# Altium footprint library Inductance.PcbLib: 64 footprints (part 3 of 4)
Each footprint in its own frame and in the unit in brackets; x right, y up, seen from the top. Pads: shape width x height; smd on the part's side, far side on the other; paste and mask are expansions set on the pad; w line width, h text height; cw(c..) or ccw(c..) is an arc to the next point about the centre after c.
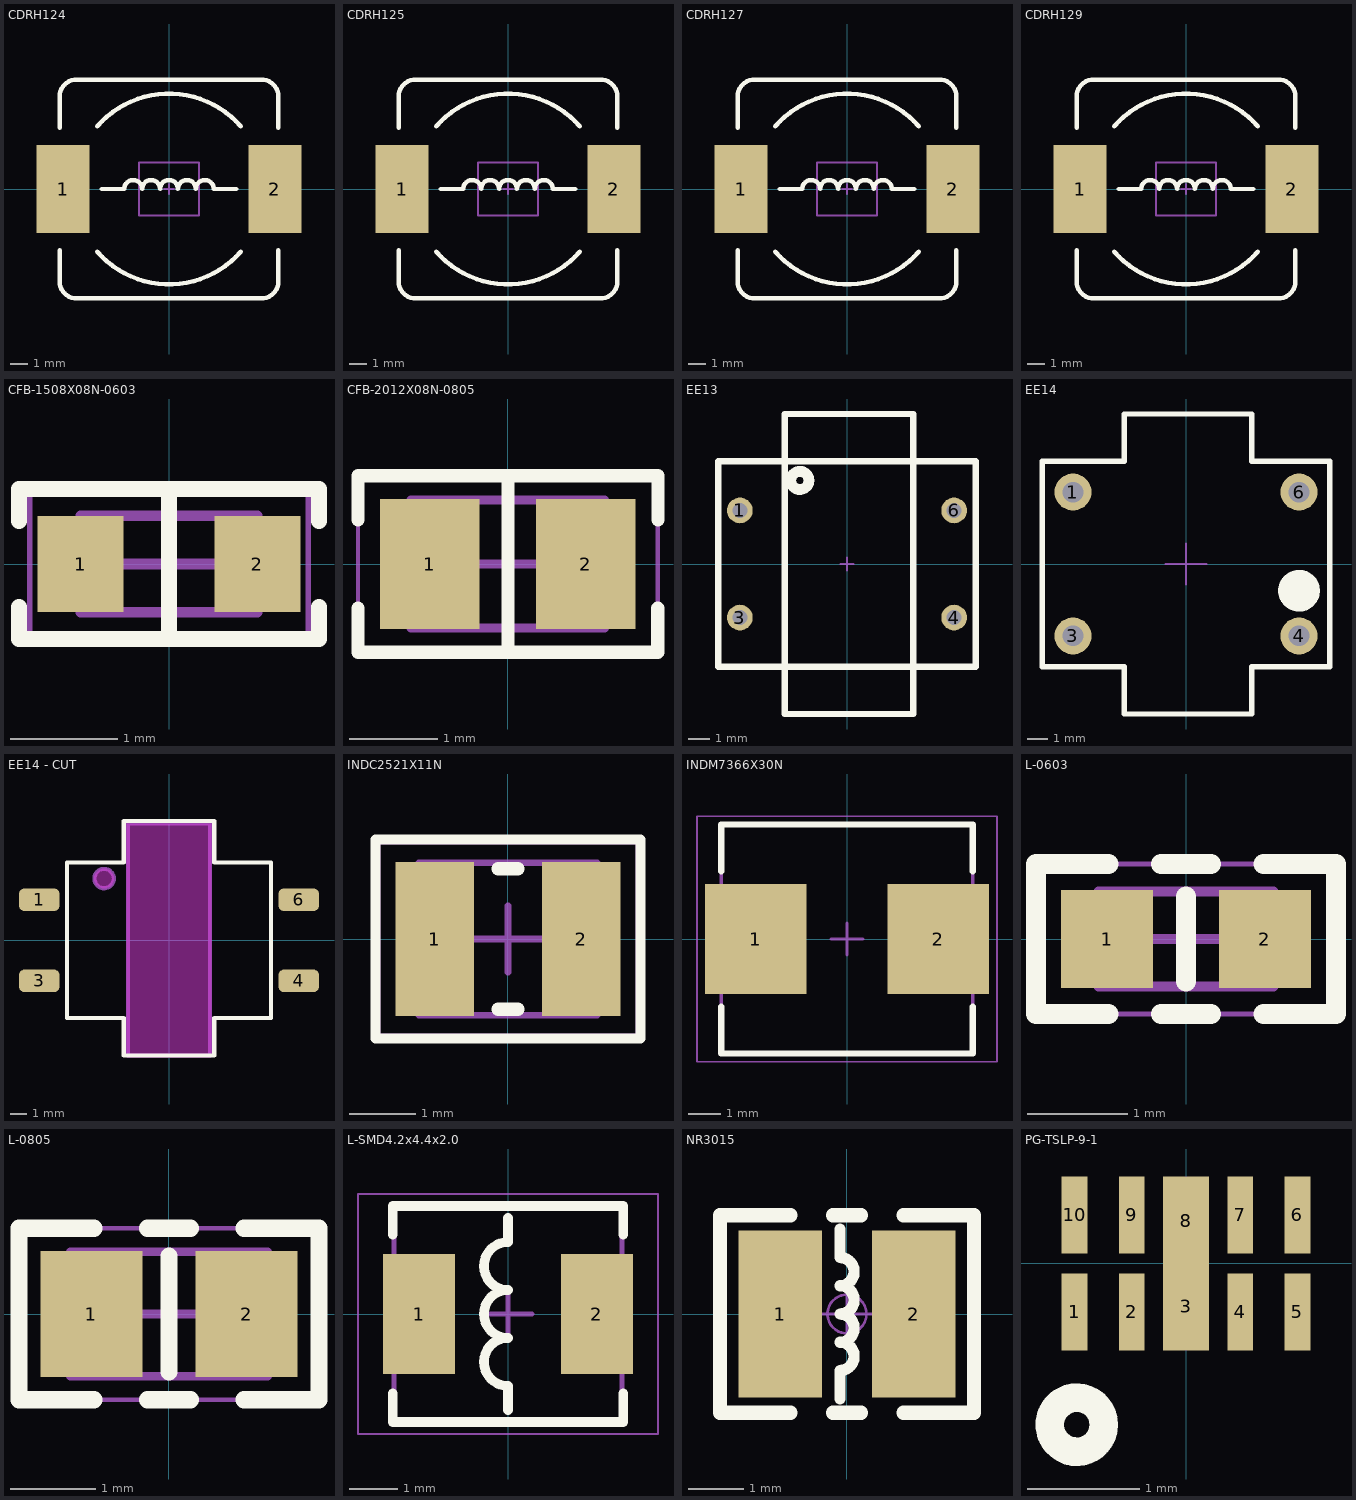
[diagram p2: the footprints below, top view; thin cyan lines are the x and y axes]

## CDRH124 [mm] "12*12*4.5mm（长宽高）"
pads (2):
  rect 3x5 smd: 1(-6,0) 2(6,0)
Top Overlay:
  lines w0.254: -6.2,-3.475 -6.2,-5.23 ccw(c-5.23,-5.23) -5.23,-6.2 5.23,-6.2 ccw(c5.23,-5.23) 6.2,-5.23 6.2,-3.475 ; -6.2,3.475 -6.2,5.23 cw(c-5.23,5.23) -5.23,6.2 5.23,6.2 cw(c5.23,5.23) 6.2,5.23 6.2,3.475 ; -4.064,-3.556 ccw(c0,0) 4.064,-3.556 ; -4.064,3.556 cw(c0,0) 4.064,3.556 ; -3.81,0 -2.54,0 cw(c-2.032,0) -1.524,0 cw(c-1.016,0) -0.508,0 cw(c0,0) 0.508,0 cw(c1.016,0) 1.524,0 cw(c2.032,0) 2.54,0 3.81,0
Top Component Outline:
  lines w0.1: -1.7,-1.5 -1.7,1.5 1.7,1.5 1.7,-1.5 -1.7,-1.5
Top Component Center:
  lines w0.1: -0.3,0 0.3,0 ; 0,-0.3 0,0.3
Top Value:
  text "'.Comment'" at -2.75,-0.38 h1.27
Top Designator:
  text ".Designator" at -3.769,-0.318 h1.52
3D body "CDRH124.STEP": height 4.55, standoff 0.05, extent -5.873,-6.031 6.127,5.969

## CDRH125 [mm] "12*12*5mm（长宽高）"
pads (2):
  rect 3x5 smd: 1(-6,0) 2(6,0)
Top Overlay:
  lines w0.254: -6.2,-3.475 -6.2,-5.23 ccw(c-5.23,-5.23) -5.23,-6.2 5.23,-6.2 ccw(c5.23,-5.23) 6.2,-5.23 6.2,-3.475 ; -6.2,3.475 -6.2,5.23 cw(c-5.23,5.23) -5.23,6.2 5.23,6.2 cw(c5.23,5.23) 6.2,5.23 6.2,3.475 ; -4.064,-3.556 ccw(c0,0) 4.064,-3.556 ; -4.064,3.556 cw(c0,0) 4.064,3.556 ; -3.81,0 -2.54,0 cw(c-2.032,0) -1.524,0 cw(c-1.016,0) -0.508,0 cw(c0,0) 0.508,0 cw(c1.016,0) 1.524,0 cw(c2.032,0) 2.54,0 3.81,0
Top Component Outline:
  lines w0.1: -1.7,-1.5 -1.7,1.5 1.7,1.5 1.7,-1.5 -1.7,-1.5
Top Component Center:
  lines w0.1: -0.3,0 0.3,0 ; 0,-0.3 0,0.3
Top Value:
  text "'.Comment'" at -2.75,-0.38 h1.27
Top Designator:
  text ".Designator" at -3.769,-0.318 h1.52
3D body "CDRH125.STEP": height 5.05, standoff 0.05, extent -5.873,-5.969 6.127,6.031

## CDRH127 [mm] "12*12*8mm（长宽高）"
pads (2):
  rect 3x5 smd: 1(-6,0) 2(6,0)
Top Overlay:
  lines w0.254: -6.2,-3.475 -6.2,-5.23 ccw(c-5.23,-5.23) -5.23,-6.2 5.23,-6.2 ccw(c5.23,-5.23) 6.2,-5.23 6.2,-3.475 ; -6.2,3.475 -6.2,5.23 cw(c-5.23,5.23) -5.23,6.2 5.23,6.2 cw(c5.23,5.23) 6.2,5.23 6.2,3.475 ; -4.064,-3.556 ccw(c0,0) 4.064,-3.556 ; -4.064,3.556 cw(c0,0) 4.064,3.556 ; -3.81,0 -2.54,0 cw(c-2.032,0) -1.524,0 cw(c-1.016,0) -0.508,0 cw(c0,0) 0.508,0 cw(c1.016,0) 1.524,0 cw(c2.032,0) 2.54,0 3.81,0
Top Component Outline:
  lines w0.1: -1.7,-1.5 -1.7,1.5 1.7,1.5 1.7,-1.5 -1.7,-1.5
Top Component Center:
  lines w0.1: -0.3,0 0.3,0 ; 0,-0.3 0,0.3
Top Value:
  text "'.Comment'" at -2.75,-0.38 h1.27
Top Designator:
  text ".Designator" at -3.769,-0.318 h1.52
3D body "CDRH127.STEP": height 7.8, standoff 0, extent -5.873,-6.031 6.127,5.969

## CDRH129 [mm] "12*12*9.5mm（长宽高）"
pads (2):
  rect 3x5 smd: 1(-6,0) 2(6,0)
Top Overlay:
  lines w0.254: -6.2,-3.475 -6.2,-5.23 ccw(c-5.23,-5.23) -5.23,-6.2 5.23,-6.2 ccw(c5.23,-5.23) 6.2,-5.23 6.2,-3.475 ; -6.2,3.475 -6.2,5.23 cw(c-5.23,5.23) -5.23,6.2 5.23,6.2 cw(c5.23,5.23) 6.2,5.23 6.2,3.475 ; -4.064,-3.556 ccw(c0,0) 4.064,-3.556 ; -4.064,3.556 cw(c0,0) 4.064,3.556 ; -3.81,0 -2.54,0 cw(c-2.032,0) -1.524,0 cw(c-1.016,0) -0.508,0 cw(c0,0) 0.508,0 cw(c1.016,0) 1.524,0 cw(c2.032,0) 2.54,0 3.81,0
Top Component Outline:
  lines w0.1: -1.7,-1.5 1.7,-1.5 1.7,1.5 -1.7,1.5 -1.7,-1.5
Top Component Center:
  lines w0.1: -0.3,0 0.3,0 ; 0,-0.3 0,0.3
Top Value:
  text "'.Comment'" at -2.75,-0.38 h1.27
Top Designator:
  text ".Designator" at -3.769,-0.318 h1.52
3D body "CDRH129.STEP": height 9.65, standoff 0.05, extent -6.127,-5.904 5.873,6.096

## CFB-1508X08N-0603 [mm] "Chip Inductor, 2-Leads, Body 1.55x0.80mm, IPC Medium Density"
height 0.8
pads (2):
  rect 0.8x0.9 smd: 1(-0.825,0) 2(0.825,0)
Top Overlay:
  lines w0.15: -1.4,-0.4 -1.4,-0.7 1.4,-0.7 1.4,-0.4 ; -1.4,0.4 -1.4,0.7 1.4,0.7 1.4,0.4 ; 0,-0.7 0,0.7
Top Courtyard:
  lines w0.05: -1.3,-0.7 1.3,-0.7 1.3,0.7 -1.3,0.7 -1.3,-0.7
  lines w0.1: -0.45,0 0.45,0 ; 0,-0.45 0,0.45
Top Assembly (Mech20):
  lines w0.1: -0.825,-0.45 0.825,-0.45 0.825,0.45 -0.825,0.45 -0.825,-0.45
3D body "0603L.STEP": height 0.8, standoff 0, extent -0.8,-0.419 0.8,0.381

## CFB-2012X08N-0805 [mm] "Chip Inductor, 2-Leads, Body 2.00x1.25mm, IPC Medium Density"
height 0.85
pads (2):
  rect 1.13x1.47 smd: 1(-0.885,0) 2(0.885,0)
Top Overlay:
  lines w0.152: -1.7,-0.5 -1.7,-1 1.7,-1 1.7,-0.5 ; -1.7,0.5 -1.7,1 1.704,1 1.704,0.504 ; 0.002,-0.998 0.002,1
Top Value:
  text "'.Comment'" at -3.464,-0.478 h1.6
Top Designator:
  text ".Designator" at -3.96,-0.334 h1.6
Top Courtyard:
  lines w0.05: -1.7,-1 1.7,-1 1.7,1 -1.7,1 -1.7,-1
  lines w0.1: -0.5,0 0.5,0 ; 0,-0.5 0,0.5
Top Assembly (Mech20):
  lines w0.1: -1.1,-0.725 1.1,-0.725 1.1,0.725 -1.1,0.725 -1.1,-0.725
3D body "0805L.STEP": height 0.9, standoff 0, extent -1,-0.6 1,0.6

## EE13 [mm] "600,1:1音频变压器"
pads (4):
  round 1.2 hole 0.7: 1(-5,2.5) 3(-5,-2.5) 4(5,-2.5) 6(5,2.5)
Top Overlay:
  circle w0.5: c-2.2,3.9 r0.424
  lines w0.3: -6,-4.8 -6,4.8 6,4.8 6,-4.8 -6,-4.8 ; -2.9,-7 -2.9,7 3.1,7 3.1,-7 -2.9,-7
Top Component Outline:
  lines w0.1: -6,-4.8 -2.9,-4.8 -2.9,-7 3.1,-7 3.1,-4.8 6,-4.8 6,4.8 3.1,4.8 3.1,7 -2.9,7 -2.9,4.8 -6,4.8 -6,-4.8
Top Component Center:
  lines w0.1: -0.3,0 0.3,0 ; 0,-0.3 0,0.3
Top Value:
  text "'.Comment'" at -2.75,-0.38 h1.27
Top Designator:
  text ".Designator" at -3.769,-0.318 h1.52
3D body "EE13-T304.SLDPRT": height 12.38, standoff 0.1, extent -6.4,-6.61 6,6.61

## EE14 [mm]
pads (4):
  round 1.8 hole 1: 1(-5.5,3.5) 3(-5.5,-3.5) 4(5.5,-3.5) 6(5.5,3.5)
Top Overlay:
  circle w1.016: c5.5,-1.3 r0.508
  lines w0.254: -7,-5 -7,5 -3,5 -3,7.3 3.2,7.3 3.2,5 7,5 7,-5 3.2,-5 3.2,-7.3 -3,-7.3 -3,-5 -7,-5
Top Component Outline:
  lines w0.1: -3.05,7.25 -3.05,5 -7,5 -7,-5 -3.05,-5 -3.05,-7.3 3.15,-7.3 3.15,-5 7,-5 7,4.991 3.159,4.991 ; -3.05,7.3 3.15,7.3 ; 3.15,5 3.15,7.25
Top Component Center:
  lines w0.1: -1,0 1,0 ; 0,-1 0,1
Top Value:
  text "'.Comment'" at -3.297,-0.455 h1.52
Top Designator:
  text ".Designator" at -4.409,-0.372 h1.78
3D body "EE13-T304.SLDPRT": height 12.38, standoff 0.1, extent -6.4,-6.61 6,6.61

## EE14 - CUT [mm]
pads (4):
  rrect50% 2.5x1.4 smd: 1(-8,2.5) 3(-8,-2.5) 4(8,-2.5) 6(8,2.5)
Top Overlay:
  lines w0.254: -6.3,-4.8 -6.3,4.8 -2.794,4.8 -2.794,7.366 2.794,7.366 2.794,4.8 6.3,4.8 6.3,-4.8 2.794,-4.8 2.794,-7.112 -2.794,-7.112 -2.794,-4.8 -6.3,-4.8
Keep-Out Layer:
  board cut-out: -4,3.21 -4.119,3.21 -4.34,3.301 -4.509,3.47 -4.6,3.691 -4.6,3.81 -4.6,3.929 -4.509,4.15 -4.34,4.319 -4.119,4.41 -4,4.41 -3.881,4.41 -3.66,4.319 -3.491,4.15 -3.4,3.929 -3.4,3.81 -3.4,3.691 -3.491,3.47 -3.66,3.301 -3.881,3.21
  board cut-out: -2.6,-7.2 -2.6,7.2 2.6,7.2 2.6,-7.2
Board Outline:
  circle w0.254: c-4,3.81 r0.6
  lines w0.254: -2.54,-7.112 2.54,-7.112 2.54,7.2 -2.54,7.2 -2.54,-7.112
Top Designator:
  text ".Designator" at 7.618,-0.381 h1.52

## INDC2521X11N [mm] "Chip Inductor, 2-Leads, Body 2.50x2.10mm, IPC Medium Density"
height 1.1
pads (2):
  rect 1.19x2.32 smd: 1(-1.105,0) 2(1.105,0)
Top Overlay:
  lines w0.152: -2,-1.5 2,-1.5 2,1.5 -2,1.5 -2,-1.5
  lines w0.2: -0.15,-1.06 0.15,-1.06 ; -0.15,1.06 0.15,1.06
Top Courtyard:
  lines w0.05: -1.95,-1.45 -1.95,1.45 1.95,1.45 1.95,-1.45 -1.95,-1.45
  lines w0.1: -0.5,0 0.5,0 ; 0,-0.5 0,0.5
Top Assembly (Mech20):
  lines w0.1: -1.35,-1.15 -1.35,1.15 1.35,1.15 1.35,-1.15 -1.35,-1.15
3D body: height 1.1, standoff 0, extent -0.85,-1.15 0.85,1.15
3D body: height 1.1, standoff 0, extent -1.35,-1.15 -0.85,1.15
3D body: height 1.1, standoff 0, extent 0.85,-1.15 1.35,1.15

## INDM7366X30N [mm] "Molded Inductor, 2-Leads, Body 7.30x6.60mm, IPC Medium Density"
height 3
pads (2):
  rect 3.15x3.4 smd: 1(-2.825,0) 2(2.825,0)
Top Overlay:
  lines w0.2: -3.9,-2.1 -3.9,-3.55 3.9,-3.55 3.9,-2.1 ; -3.9,2.1 -3.9,3.55 3.9,3.55 3.9,2.1
Top Value:
  text "'.Comment'" at -4.314,-0.581 h2
Top Designator:
  text "'.Designator'" at -5.72,-0.418 h2
Top Courtyard:
  lines w0.05: -4.65,-3.8 4.65,-3.8 4.65,3.8 -4.65,3.8 -4.65,-3.8
  lines w0.1: -0.5,0 0.5,0 ; 0,-0.5 0,0.5
Top Assembly (Mech20):
  lines w0.1: -3.9,-3.55 3.9,-3.55 3.9,3.55 -3.9,3.55 -3.9,-3.55
3D body: height 3, standoff 0, extent -3.9,-3.55 3.9,3.55

## L-0603 [mm] "Chip Inductor, 2-Leads, Body 1.60x0.80mm, IPC Medium Density"
height 0.8
pads (2):
  rect 0.92x0.98 smd: 1(-0.79,0) 2(0.79,0)
Top Overlay:
  lines w0.2: -0.775,-0.75 -1.5,-0.75 -1.5,0.75 -0.775,0.75 ; -0.25,-0.75 0.25,-0.75 ; -0.25,0.75 0.25,0.75 ; 0,-0.425 0,0.425 ; 0.775,-0.75 1.5,-0.75 1.5,0.75 0.775,0.75
Top Value:
  text "'.Comment'" at -1.718,-0.231 h0.8
Top Designator:
  text "'.Designator'" at -2.279,-0.167 h0.8
Top Courtyard:
  lines w0.05: -1.5,-0.75 -1.5,0.75 1.5,0.75 1.5,-0.75 -1.5,-0.75
  lines w0.1: -0.475,0 0.475,0 ; 0,-0.475 0,0.475
Top Assembly (Mech20):
  lines w0.1: -0.875,-0.475 -0.875,0.475 0.875,0.475 0.875,-0.475 -0.875,-0.475
3D body "INDC-0603.stp": height 0.95, standoff 0, extent -0.875,-0.475 0.875,0.475

## L-0805 [mm] "Chip Inductor, 2-Leads, Body 2.10x1.25mm, IPC Medium Density"
height 1.25
pads (2):
  rect 1.19x1.47 smd: 1(-0.905,0) 2(0.905,0)
Top Overlay:
  lines w0.2: -0.875,-1 -1.75,-1 -1.75,1 -0.875,1 ; -0.25,-1 0.25,-1 ; -0.25,1 0.25,1 ; 0,-0.675 0,0.675 ; 0.875,-1 1.75,-1 1.75,1 0.875,1
Top Value:
  text "'.Comment'" at -2.157,-0.291 h1
Top Designator:
  text "'.Designator'" at -2.86,-0.209 h1
Top Courtyard:
  lines w0.05: -1.75,-1 1.75,-1 1.75,1 -1.75,1 -1.75,-1
  lines w0.1: -0.5,0 0.5,0 ; 0,-0.5 0,0.5
Top Assembly (Mech20):
  lines w0.1: -1.15,-0.725 1.15,-0.725 1.15,0.725 -1.15,0.725 -1.15,-0.725
3D body "INDC-0805-T1.05.stp": height 1.05, standoff 0, extent -1.1,-0.725 1.1,0.725

## L-SMD4.2x4.4x2.0 [mm] "Molded Inductor, 2-Leads, Body 4.40x4.20mm, IPC Medium Density"
height 1
pads (2):
  rect 1.5x2.5 smd: 1(-1.85,0) 2(1.85,0)
Top Overlay:
  lines w0.2: -2.4,-1.65 -2.4,-2.25 2.4,-2.25 2.4,-1.65 ; -2.4,1.65 -2.4,2.25 2.4,2.25 2.4,1.65 ; 0,-2 0,-1.5 cw(c0,-1) -0.5,-1 cw(c0,-1) 0,-0.5 cw(c0,0) -0.5,0 cw(c0,0) 0,0.5 cw(c0,1) -0.5,1 cw(c0,1) 0,1.5 0,2
Top Courtyard:
  lines w0.05: -3.125,-2.5 -3.125,2.5 3.125,2.5 3.125,-2.5 -3.125,-2.5
  lines w0.1: -0.5,0 0.5,0 ; 0,-0.5 0,0.5
Top Assembly (Mech20):
  lines w0.1: -2.375,-2.225 -2.375,2.225 2.375,2.225 2.375,-2.225 -2.375,-2.225
3D body: height 1, standoff 0, extent -2.375,-2.225 2.375,2.225

## NR3015 [mm] "3mm*3mm*1.5mm(长*宽*高）"
pads (2):
  rect 1.5x3 smd: 1(-1.2,0) 2(1.2,0)
Top Overlay:
  lines w0.203: -0.127,-1.524 -0.127,-1.016 ccw(c-0.127,-0.762) -0.127,-0.508 ccw(c-0.127,-0.254) -0.127,0 ccw(c-0.127,0.254) -0.127,0.508 ccw(c-0.127,0.762) -0.127,1.016 -0.127,1.524
  lines w0.254: -1.016,-1.778 -2.286,-1.778 -2.286,1.778 -1.016,1.778 ; -0.254,-1.778 0.254,-1.778 ; -0.254,1.778 0.254,1.778 ; 1.016,-1.778 2.286,-1.778 2.286,1.778 1.016,1.778
Top Designator:
  text ".Designator" at 7.618,-0.508 h1.52
Bottom Courtyard:
  circle w0.05: c0,0 r0.35
  lines w0.05: -0.5,0 0.5,0 ; 0,-0.5 0,0.5
3D body "NR3015.STEP": height 1.45, standoff 0.05, extent -1.524,-1.5 1.476,1.5

## PG-TSLP-9-1 [mil]
pads (10):
  rect 9x27 smd: 1(-39,-17) 2(-19,-17) 4(19,-17) 5(39,-17) 6(39,17) 7(19,17) 9(-19,17) 10(-39,17)
  rect 16x31 smd: 3(0,-15) 8(0,15)
Top Overlay:
  circle w10: c-38.22,-56.45 r9.46
Top Designator:
  text ".Designator" at 298.71,-36.58 h60
3D body: height 12.2, standoff 0, extent -49.24,-38.14 50.29,37.73